# Altium footprint library WR-PHD_Socket Header_2.00mm.PcbLib: 62 footprints (part 1 of 4)
Each footprint in its own frame and in the unit in brackets; x right, y up, seen from the top. Pads: shape width x height; smd on the part's side, far side on the other; paste and mask are expansions set on the pad; w line width, h text height; cw(c..) or ccw(c..) is an arc to the next point about the centre after c.
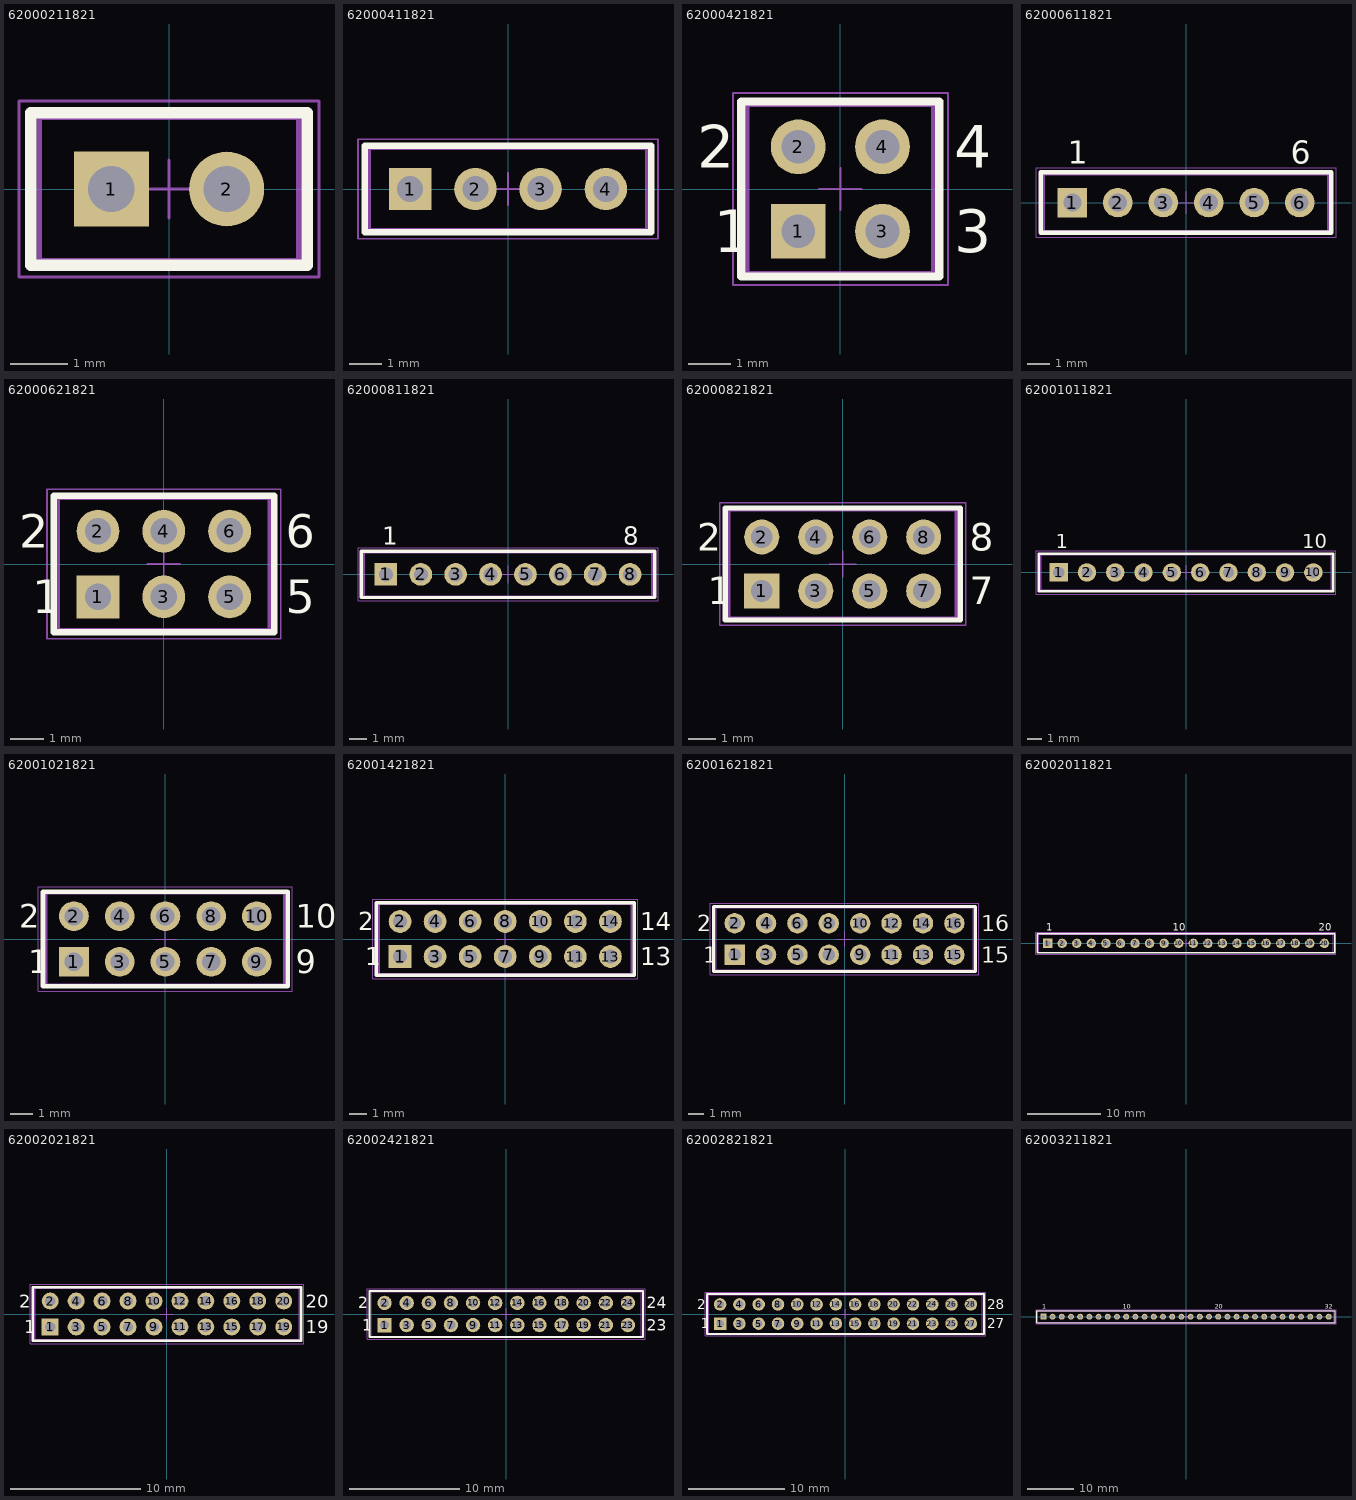
[diagram p0: the footprints below, top view; thin cyan lines are the x and y axes]

## 62000211821 [mm] "Socket Header, Pitch 2.00 mm, THT, Vertical, single row, 2p"
height 4.45
pads (2):
  rect 1.3x1.3 hole 0.8: 1(-1,0)
  round 1.3 hole 0.8: 2(1,0)
Top Overlay:
  lines w0.2: -2.4,-1.325 2.4,-1.325 2.4,1.325 -2.4,1.325 -2.4,-1.325
Mechanical 13:
  lines w0.1: -2.25,-1.25 2.25,-1.25 2.25,1.25 -2.25,1.25 -2.25,-1.25
Mechanical 15:
  lines w0.05: -0.5,0 0.5,0 ; 0,-0.5 0,0.5 ; -2.6,-1.525 2.6,-1.525 2.6,1.525 -2.6,1.525 -2.6,-1.525
3D body "62000211821.stp": height 4.35, standoff -2.65, extent -2.25,-1.25 2.25,1.25

## 62000411821 [mm] "Socket Header, Pitch 2.00 mm, THT, Vertical, single row, 4p"
height 4.45
pads (4):
  rect 1.3x1.3 hole 0.8: 1(-3,0)
  round 1.3 hole 0.8: 2(-1,0) 3(1,0) 4(3,0)
Top Overlay:
  lines w0.2: -4.4,-1.325 -4.4,1.325 4.4,1.325 4.4,-1.325 -4.4,-1.325
Mechanical 13:
  lines w0.1: -4.25,-1.25 -4.25,1.25 4.25,1.25 4.25,-1.25 -4.25,-1.25
Mechanical 15:
  lines w0.05: -0.5,0 0.5,0 ; 0,-0.5 0,0.5 ; -4.6,-1.525 -4.6,1.525 4.6,1.525 4.6,-1.525 -4.6,-1.525
3D body "62000411821.stp": height 4.35, standoff -2.65, extent -4.25,-1.25 4.25,1.25

## 62000421821 [mm] "Socket Header, Pitch 2.00 mm, THT, Vertical, dual row, 4p"
height 4.45
pads (4):
  rect 1.3x1.3 hole 0.8: 1(-1,-1)
  round 1.3 hole 0.8: 2(-1,1) 3(1,-1) 4(1,1)
Top Overlay:
  lines w0.2: -2.35,-2.075 -2.35,2.075 2.35,2.075 2.35,-2.075 -2.35,-2.075
  text "1" at -3,-1.5 h1.02
  text "3" at 2.7,-1.5 h1.02
  text "2" at -3.4,0.5 h1.02
  text "4" at 2.7,0.5 h1.02
Mechanical 13:
  lines w0.1: -2.2,-2 -2.2,2 2.2,2 2.2,-2 -2.2,-2
Mechanical 15:
  lines w0.05: -0.5,0 0.5,0 ; 0,-0.5 0,0.5 ; -2.55,-2.275 -2.55,2.275 2.55,2.275 2.55,-2.275 -2.55,-2.275
3D body "62000421821.stp": height 4.35, standoff -2.65, extent -2.3,-2 2.3,2

## 62000611821 [mm] "Socket Header, Pitch 2.00 mm, THT, Vertical, single row, 6p"
height 4.45
pads (6):
  rect 1.3x1.3 hole 0.8: 1(-5,0)
  round 1.3 hole 0.8: 2(-3,0) 3(-1,0) 4(1,0) 5(3,0) 6(5,0)
Top Overlay:
  lines w0.2: -6.4,-1.325 -6.4,1.325 6.4,1.325 6.4,-1.325 -6.4,-1.325
  text "1" at -5.2,1.7 h1.02
  text "6" at 4.6,1.7 h1.02
Mechanical 13:
  lines w0.1: -6.25,-1.25 -6.25,1.25 6.25,1.25 6.25,-1.25 -6.25,-1.25
Mechanical 15:
  lines w0.05: -0.5,0 0.5,0 ; 0,-0.5 0,0.5 ; -6.6,-1.525 -6.6,1.525 6.6,1.525 6.6,-1.525 -6.6,-1.525
3D body "62000611821.stp": height 4.35, standoff -2.65, extent -6.25,-1.25 6.25,1.25

## 62000621821 [mm] "Socket Header, Pitch 2.00 mm, THT, Vertical, dual row, 6p"
height 4.45
pads (6):
  rect 1.3x1.3 hole 0.8: 1(-2,-1)
  round 1.3 hole 0.8: 2(-2,1) 3(0,-1) 4(0,1) 5(2,-1) 6(2,1)
Top Overlay:
  lines w0.2: -3.35,-2.075 3.35,-2.075 3.35,2.075 -3.35,2.075 -3.35,-2.075
  text "2" at -4.4,0.5 h1.02
  text "1" at -4,-1.5 h1.02
  text "5" at 3.7,-1.5 h1.02
  text "6" at 3.7,0.5 h1.02
Mechanical 13:
  lines w0.1: -3.2,-2 3.2,-2 3.2,2 -3.2,2 -3.2,-2
Mechanical 15:
  lines w0.05: -0.5,0 0.5,0 ; 0,-0.5 0,0.5 ; -3.55,-2.275 3.55,-2.275 3.55,2.275 -3.55,2.275 -3.55,-2.275
3D body "62000621821.stp": height 4.35, standoff -2.65, extent -3.3,-2 3.3,2

## 62000811821 [mm] "Socket Header, Pitch 2.00 mm, THT, Vertical, single row, 8p"
height 4.45
pads (8):
  rect 1.3x1.3 hole 0.8: 1(-7,0)
  round 1.3 hole 0.8: 2(-5,0) 3(-3,0) 4(-1,0) 5(1,0) 6(3,0) 7(5,0) 8(7,0)
Top Overlay:
  lines w0.2: -8.4,-1.325 8.4,-1.325 8.4,1.325 -8.4,1.325 -8.4,-1.325
  text "1" at -7.2,1.7 h1.02
  text "8" at 6.6,1.7 h1.02
Mechanical 13:
  lines w0.1: -8.25,-1.25 8.25,-1.25 8.25,1.25 -8.25,1.25 -8.25,-1.25
Mechanical 15:
  lines w0.05: -0.5,0 0.5,0 ; 0,-0.5 0,0.5 ; -8.6,-1.525 8.6,-1.525 8.6,1.525 -8.6,1.525 -8.6,-1.525
3D body "62000811821.stp": height 4.35, standoff -2.65, extent -8.25,-1.25 8.25,1.25

## 62000821821 [mm] "Socket Header, Pitch 2.00 mm, THT, Vertical, dual row, 8p"
height 4.45
pads (8):
  rect 1.3x1.3 hole 0.8: 1(-3,-1)
  round 1.3 hole 0.8: 2(-3,1) 3(-1,-1) 4(-1,1) 5(1,-1) 6(1,1) 7(3,-1) 8(3,1)
Top Overlay:
  lines w0.2: -4.35,-2.075 -4.35,2.075 4.35,2.075 4.35,-2.075 -4.35,-2.075
  text "1" at -5,-1.5 h1.02
  text "2" at -5.4,0.5 h1.02
  text "7" at 4.7,-1.5 h1.02
  text "8" at 4.7,0.5 h1.02
Mechanical 13:
  lines w0.1: -4.2,-2 -4.2,2 4.2,2 4.2,-2 -4.2,-2
Mechanical 15:
  lines w0.05: -0.5,0 0.5,0 ; 0,-0.5 0,0.5 ; -4.55,-2.275 -4.55,2.275 4.55,2.275 4.55,-2.275 -4.55,-2.275
3D body "62000821821.stp": height 4.35, standoff -2.65, extent -4.3,-2 4.3,2

## 62001011821 [mm] "Socket Header, Pitch 2.00 mm, THT, Vertical, single row, 10p"
height 4.45
pads (10):
  rect 1.3x1.3 hole 0.8: 1(-9,0)
  round 1.3 hole 0.8: 2(-7,0) 3(-5,0) 4(-3,0) 5(-1,0) 6(1,0) 7(3,0) 8(5,0) 9(7,0) 10(9,0)
Top Overlay:
  lines w0.2: -10.4,-1.325 10.4,-1.325 10.4,1.325 -10.4,1.325 -10.4,-1.325
  text "10" at 8.2,1.7 h1.02
  text "1" at -9.2,1.7 h1.02
Mechanical 13:
  lines w0.1: -10.25,-1.25 10.25,-1.25 10.25,1.25 -10.25,1.25 -10.25,-1.25
Mechanical 15:
  lines w0.05: -0.5,0 0.5,0 ; 0,-0.5 0,0.5 ; -10.6,-1.525 10.6,-1.525 10.6,1.525 -10.6,1.525 -10.6,-1.525
3D body "62001011821.stp": height 4.35, standoff -2.65, extent -10.25,-1.25 10.25,1.25

## 62001021821 [mm] "Socket Header, Pitch 2.00 mm, THT, Vertical, dual row, 10p"
height 4.45
pads (10):
  rect 1.3x1.3 hole 0.8: 1(-4,-1)
  round 1.3 hole 0.8: 2(-4,1) 3(-2,-1) 4(-2,1) 5(0,-1) 6(0,1) 7(2,-1) 8(2,1) 9(4,-1) 10(4,1)
Top Overlay:
  lines w0.2: -5.35,-2.075 -5.35,2.075 5.35,2.075 5.35,-2.075 -5.35,-2.075
  text "1" at -6,-1.5 h1.02
  text "2" at -6.4,0.5 h1.02
  text "9" at 5.7,-1.5 h1.02
  text "10" at 5.7,0.5 h1.02
Mechanical 13:
  lines w0.1: -5.2,-2 -5.2,2 5.2,2 5.2,-2 -5.2,-2
Mechanical 15:
  lines w0.05: -0.5,0 0.5,0 ; 0,-0.5 0,0.5 ; -5.55,-2.275 -5.55,2.275 5.55,2.275 5.55,-2.275 -5.55,-2.275
3D body "62001021821.stp": height 4.35, standoff -2.65, extent -5.3,-2 5.3,2

## 62001421821 [mm] "Socket Header, Pitch 2.00 mm, THT, Vertical, dual row, 14p"
height 4.45
pads (14):
  rect 1.3x1.3 hole 0.8: 1(-6,-1)
  round 1.3 hole 0.8: 2(-6,1) 3(-4,-1) 4(-4,1) 5(-2,-1) 6(-2,1) 7(0,-1) 8(0,1) 9(2,-1) 10(2,1) 11(4,-1) 12(4,1) 13(6,-1) 14(6,1)
Top Overlay:
  lines w0.2: -7.35,-2.075 7.35,-2.075 7.35,2.075 -7.35,2.075 -7.35,-2.075
  text "2" at -8.4,0.5 h1.02
  text "1" at -8,-1.5 h1.02
  text "13" at 7.7,-1.5 h1.02
  text "14" at 7.7,0.5 h1.02
Mechanical 13:
  lines w0.1: -7.2,-2 7.2,-2 7.2,2 -7.2,2 -7.2,-2
Mechanical 15:
  lines w0.05: -0.5,0 0.5,0 ; 0,-0.5 0,0.5 ; -7.55,-2.275 7.55,-2.275 7.55,2.275 -7.55,2.275 -7.55,-2.275
3D body "62001421821.stp": height 4.35, standoff -2.65, extent -7.3,-2 7.3,2

## 62001621821 [mm] "Socket Header, Pitch 2.00 mm, THT, Vertical, dual row, 16p"
height 4.45
pads (16):
  rect 1.3x1.3 hole 0.8: 1(-7,-1)
  round 1.3 hole 0.8: 2(-7,1) 3(-5,-1) 4(-5,1) 5(-3,-1) 6(-3,1) 7(-1,-1) 8(-1,1) 9(1,-1) 10(1,1) 11(3,-1) 12(3,1) 13(5,-1) 14(5,1) 15(7,-1) 16(7,1)
Top Overlay:
  lines w0.2: -8.35,-2.075 -8.35,2.075 8.35,2.075 8.35,-2.075 -8.35,-2.075
  text "1" at -9,-1.5 h1.02
  text "2" at -9.4,0.5 h1.02
  text "15" at 8.7,-1.5 h1.02
  text "16" at 8.7,0.5 h1.02
Mechanical 13:
  lines w0.1: -8.2,-2 -8.2,2 8.2,2 8.2,-2 -8.2,-2
Mechanical 15:
  lines w0.05: -0.5,0 0.5,0 ; 0,-0.5 0,0.5 ; -8.55,-2.275 -8.55,2.275 8.55,2.275 8.55,-2.275 -8.55,-2.275
3D body "62001621821.stp": height 4.35, standoff -2.65, extent -8.3,-2 8.3,2

## 62002011821 [mm] "Socket Header, Pitch 2.00 mm, THT, Vertical, single row, 20p"
height 4.45
pads (20):
  rect 1.3x1.3 hole 0.8: 1(-19,0)
  round 1.3 hole 0.8: 2(-17,0) 3(-15,0) 4(-13,0) 5(-11,0) 6(-9,0) 7(-7,0) 8(-5,0) 9(-3,0) 10(-1,0) 11(1,0) 12(3,0) 13(5,0) 14(7,0) 15(9,0) 16(11,0) 17(13,0) 18(15,0) 19(17,0) 20(19,0)
Top Overlay:
  lines w0.2: -20.4,-1.325 -20.4,1.325 20.4,1.325 20.4,-1.325 -20.4,-1.325
  text "20" at 18.2,1.7 h1.02
  text "1" at -19.2,1.7 h1.02
  text "10" at -1.8,1.7 h1.02
Mechanical 13:
  lines w0.1: -20.25,-1.25 -20.25,1.25 20.25,1.25 20.25,-1.25 -20.25,-1.25
Mechanical 15:
  lines w0.05: -0.5,0 0.5,0 ; 0,-0.5 0,0.5 ; -20.6,-1.525 -20.6,1.525 20.6,1.525 20.6,-1.525 -20.6,-1.525
3D body "62002011821.stp": height 4.35, standoff -2.65, extent -20.25,-1.25 20.25,1.25

## 62002021821 [mm] "Socket Header, Pitch 2.00 mm, THT, Vertical, dual row, 20p"
height 4.45
pads (20):
  rect 1.3x1.3 hole 0.8: 1(-9,-1)
  round 1.3 hole 0.8: 2(-9,1) 3(-7,-1) 4(-7,1) 5(-5,-1) 6(-5,1) 7(-3,-1) 8(-3,1) 9(-1,-1) 10(-1,1) 11(1,-1) 12(1,1) 13(3,-1) 14(3,1) 15(5,-1) 16(5,1) 17(7,-1) 18(7,1) 19(9,-1) 20(9,1)
Top Overlay:
  lines w0.2: -10.35,-2.075 10.35,-2.075 10.35,2.075 -10.35,2.075 -10.35,-2.075
  text "2" at -11.4,0.5 h1.02
  text "1" at -11,-1.5 h1.02
  text "19" at 10.7,-1.5 h1.02
  text "20" at 10.7,0.5 h1.02
Mechanical 13:
  lines w0.1: -10.2,-2 10.2,-2 10.2,2 -10.2,2 -10.2,-2
Mechanical 15:
  lines w0.05: -0.5,0 0.5,0 ; 0,-0.5 0,0.5 ; -10.55,-2.275 10.55,-2.275 10.55,2.275 -10.55,2.275 -10.55,-2.275
3D body "62002021821.stp": height 4.35, standoff -2.65, extent -10.3,-2 10.3,2

## 62002421821 [mm] "Socket Header, Pitch 2.00 mm, THT, Vertical, dual row, 24p"
height 4.45
pads (24):
  rect 1.3x1.3 hole 0.8: 1(-11,-1)
  round 1.3 hole 0.8: 2(-11,1) 3(-9,-1) 4(-9,1) 5(-7,-1) 6(-7,1) 7(-5,-1) 8(-5,1) 9(-3,-1) 10(-3,1) 11(-1,-1) 12(-1,1) 13(1,-1) 14(1,1) 15(3,-1) 16(3,1) 17(5,-1) 18(5,1) 19(7,-1) 20(7,1) 21(9,-1) 22(9,1) 23(11,-1) 24(11,1)
Top Overlay:
  lines w0.2: -12.35,-2.075 12.35,-2.075 12.35,2.075 -12.35,2.075 -12.35,-2.075
  text "24" at 12.7,0.5 h1.02
  text "23" at 12.7,-1.5 h1.02
  text "2" at -13.4,0.5 h1.02
  text "1" at -13,-1.5 h1.02
Mechanical 13:
  lines w0.1: -12.2,-2 12.2,-2 12.2,2 -12.2,2 -12.2,-2
Mechanical 15:
  lines w0.05: -0.5,0 0.5,0 ; 0,-0.5 0,0.5 ; -12.55,-2.275 12.55,-2.275 12.55,2.275 -12.55,2.275 -12.55,-2.275
3D body "62002421821.stp": height 4.35, standoff -2.65, extent -12.3,-2 12.3,2

## 62002821821 [mm] "Socket Header, Pitch 2.00 mm, THT, Vertical, dual row, 28p"
height 4.45
pads (28):
  rect 1.3x1.3 hole 0.8: 1(-13,-1)
  round 1.3 hole 0.8: 2(-13,1) 3(-11,-1) 4(-11,1) 5(-9,-1) 6(-9,1) 7(-7,-1) 8(-7,1) 9(-5,-1) 10(-5,1) 11(-3,-1) 12(-3,1) 13(-1,-1) 14(-1,1) 15(1,-1) 16(1,1) 17(3,-1) 18(3,1) 19(5,-1) 20(5,1) 21(7,-1) 22(7,1) 23(9,-1) 24(9,1) 25(11,-1) 26(11,1) 27(13,-1) 28(13,1)
Top Overlay:
  lines w0.2: -14.35,-2.075 14.35,-2.075 14.35,2.075 -14.35,2.075 -14.35,-2.075
  text "2" at -15.4,0.5 h1.02
  text "1" at -15,-1.5 h1.02
  text "27" at 14.7,-1.5 h1.02
  text "28" at 14.7,0.5 h1.02
Mechanical 13:
  lines w0.1: -14.2,-2 14.2,-2 14.2,2 -14.2,2 -14.2,-2
Mechanical 15:
  lines w0.05: -0.5,0 0.5,0 ; 0,-0.5 0,0.5 ; -14.55,-2.275 14.55,-2.275 14.55,2.275 -14.55,2.275 -14.55,-2.275
3D body "62002821821.stp": height 4.35, standoff -2.65, extent -14.3,-2 14.3,2

## 62003211821 [mm] "Socket Header, Pitch 2.00 mm, THT, Vertical, single row, 32p"
height 4.45
pads (32):
  rect 1.3x1.3 hole 0.8: 1(-31,0)
  round 1.3 hole 0.8: 2(-29,0) 3(-27,0) 4(-25,0) 5(-23,0) 6(-21,0) 7(-19,0) 8(-17,0) 9(-15,0) 10(-13,0) 11(-11,0) 12(-9,0) 13(-7,0) 14(-5,0) 15(-3,0) 16(-1,0) 17(1,0) 18(3,0) 19(5,0) 20(7,0) 21(9,0) 22(11,0) 23(13,0) 24(15,0) 25(17,0) 26(19,0) 27(21,0) 28(23,0) 29(25,0) 30(27,0) 31(29,0) 32(31,0)
Top Overlay:
  lines w0.2: -32.4,-1.325 32.4,-1.325 32.4,1.325 -32.4,1.325 -32.4,-1.325
  text "10" at -13.8,1.7 h1.02
  text "1" at -31.2,1.7 h1.02
  text "20" at 6.2,1.7 h1.02
  text "32" at 30.2,1.7 h1.02
Mechanical 13:
  lines w0.1: -32.25,-1.25 32.25,-1.25 32.25,1.25 -32.25,1.25 -32.25,-1.25
Mechanical 15:
  lines w0.05: -0.5,0 0.5,0 ; 0,-0.5 0,0.5 ; -32.6,-1.525 32.6,-1.525 32.6,1.525 -32.6,1.525 -32.6,-1.525
3D body "62003211821.stp": height 4.35, standoff -2.65, extent -32.25,-1.25 32.25,1.25